# Altium footprint library SYNCBOX_TST.PcbLib: 267 footprints (part 6 of 17)
Each footprint in its own frame and in the unit in brackets; x right, y up, seen from the top. Pads: shape width x height; smd on the part's side, far side on the other; paste and mask are expansions set on the pad; w line width, h text height; cw(c..) or ccw(c..) is an arc to the next point about the centre after c.
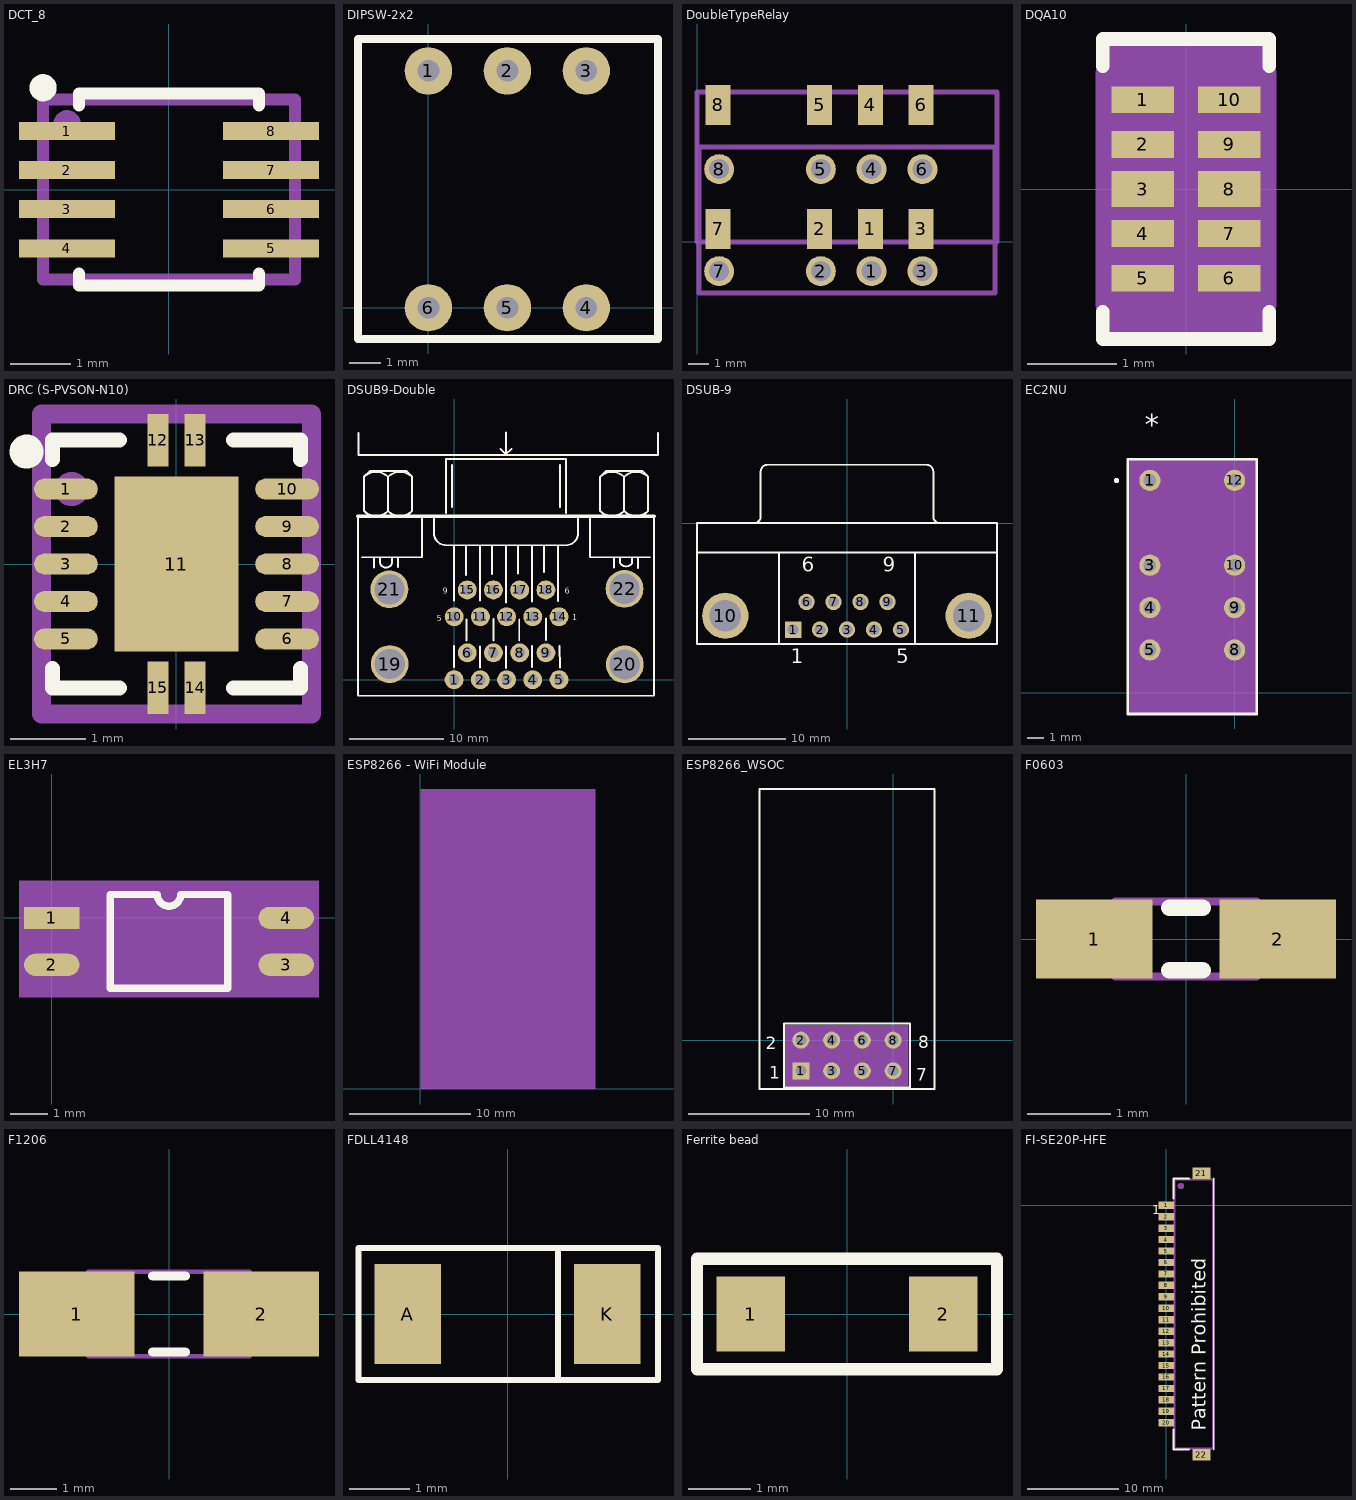
[diagram p5: the footprints below, top view; thin cyan lines are the x and y axes]

## DCT_8 [mm]
pads (8):
  rect 1.6x0.3 smd mask+0.07: 1(-1.7,0.975) 2(-1.7,0.325) 3(-1.7,-0.325) 4(-1.7,-0.975) 5(1.7,-0.975) 6(1.7,-0.325) 7(1.7,0.325) 8(1.7,0.975)
Top Overlay:
  circle w0.254: c-2.1,1.7 r0.1
  lines w0.2: -1.5,-1.4 -1.5,-1.6 1.5,-1.6 1.5,-1.4 ; -1.5,1.4 -1.5,1.6 1.5,1.6 1.5,1.4
Mechanical 16:
  circle w0.254: c-1.7,1.1 r0.1
  lines w0.2: -2.1,-1.5 2.1,-1.5 2.1,1.5 -2.1,1.5 -2.1,-1.5
Mechanical 29:
  text ".Designator" at -0.7,-0.5 h0.8
3D body "DCT-8.STEP": height 1.3, standoff 0, extent -2.1,-1.525 2.1,1.525

## DIPSW-2x2 [mil] "2 WAY DIP SW 2 CRCTS"
pads (6):
  round 60 hole 27.56: 1(0,300) 2(100,300) 3(200,300) 4(200,0) 5(100,0) 6(0,0)
Top Overlay:
  lines w10: -89.17,-39.57 -89.17,340.35 290.75,340.35 290.75,-39.57 -89.17,-39.57
3D body "KAP1103E.stp": height 397.12, standoff -137.8, extent -78.71,-50.59 282.71,445.87

## DoubleTypeRelay [mm] "DC Relay with both SMD and TH pads"
pads (16):
  rect 1.25x2 smd mask+0.2: 1(8.66,0.65) 2(6.12,0.65) 3(11.2,0.65) 4(8.66,6.85) 5(6.12,6.85) 6(11.2,6.85) 7(1.04,0.65) 8(1.04,6.85)
  round 1.5 hole 1 mask+0.25: 1(8.72,-1.47) 2(6.18,-1.47) 3(11.26,-1.47) 4(8.72,3.63) 5(6.18,3.63) 6(11.26,3.63) 7(1.1,-1.47)
  round 1.5 hole 1 paste+0.25 mask+0.25: 8(1.1,3.63)
Mechanical 1:
  lines w0.254: -0.01,0 14.99,0 14.99,7.5 -0.01,7.5 -0.01,0 ; 0.1,-2.57 14.9,-2.57 14.9,4.73 0.1,4.73 0.1,-2.57

## DQA10 [mm]
pads (10):
  rect 0.702x0.3 smd paste-0.15 mask+0: 1(-0.486,1) 2(-0.486,0.5) 4(-0.486,-0.5) 5(-0.486,-1) 6(0.486,-1) 7(0.486,-0.5) 9(0.486,0.5) 10(0.486,1)
  rect 0.702x0.4 smd paste+0 mask+0: 3(-0.486,0) 8(0.486,0)
Top Overlay:
  lines w0.152: -0.931,-1.374 -0.931,-1.681 0.931,-1.681 0.931,-1.374 ; -0.931,1.374 -0.931,1.681 0.931,1.681 0.931,1.374
Top Paste:
  region: -0.135,1.15 -0.685,1.15 -0.685,0.85 -0.135,0.85
  region: -0.135,0.65 -0.685,0.65 -0.685,0.35 -0.135,0.35
  region: -0.135,0.15 -0.685,0.15 -0.685,-0.15 -0.135,-0.15
  region: -0.135,-0.35 -0.685,-0.35 -0.685,-0.65 -0.135,-0.65
  region: -0.135,-0.85 -0.685,-0.85 -0.685,-1.15 -0.135,-1.15
  region: 0.685,-0.85 0.135,-0.85 0.135,-1.15 0.685,-1.15
  region: 0.685,-0.35 0.135,-0.35 0.135,-0.65 0.685,-0.65
  region: 0.685,0.15 0.135,0.15 0.135,-0.15 0.685,-0.15
  region: 0.685,0.65 0.135,0.65 0.135,0.35 0.685,0.35
  region: 0.685,1.15 0.135,1.15 0.135,0.85 0.685,0.85
Top Solder:
  region: -0.085,1.2 -0.735,1.2 -0.735,0.8 -0.085,0.8
  region: -0.085,0.7 -0.735,0.7 -0.735,0.3 -0.085,0.3
  region: -0.085,0.2 -0.735,0.2 -0.735,-0.2 -0.085,-0.2
  region: -0.085,-0.3 -0.735,-0.3 -0.735,-0.7 -0.085,-0.7
  region: -0.085,-0.8 -0.735,-0.8 -0.735,-1.2 -0.085,-1.2
  region: 0.735,-0.8 0.085,-0.8 0.085,-1.2 0.735,-1.2
  region: 0.735,-0.3 0.085,-0.3 0.085,-0.7 0.735,-0.7
  region: 0.735,0.2 0.085,0.2 0.085,-0.2 0.735,-0.2
  region: 0.735,0.7 0.085,0.7 0.085,0.3 0.735,0.3
  region: 0.735,1.2 0.085,1.2 0.085,0.8 0.735,0.8
Mechanical 13:
  lines w0: -0.305,1.3 ccw(c0,1.3) 0.305,1.3
  lines w0.025: -0.55,-1.3 0.55,-1.3 0.55,1.3 -0.55,1.3 -0.55,-1.3
Mechanical 15:
  region: -0.804,-1.301 -0.939,-1.301 -0.939,1.301 -0.804,1.301 -0.804,1.554 0.804,1.554 0.804,1.301 0.939,1.301 0.939,-1.301 0.804,-1.301 0.804,-1.554 -0.804,-1.554
  lines w0.152: -0.939,-1.301 -0.939,1.301 -0.804,1.301 -0.804,1.554 0.804,1.554 0.804,1.301 0.939,1.301 0.939,-1.301 0.804,-1.301 0.804,-1.554 -0.804,-1.554 -0.804,-1.301 -0.939,-1.301
3D body: height 0.25, standoff 0, extent 0,0 0.254,0.254
3D body "DQA10.stp": height 0.55, standoff 0, extent -0.55,-1.3 0.55,1.3

## DRC (S-PVSON-N10) [mm]
pads (15):
  oval 0.85x0.28 smd mask+0.025: 1(-1.475,1) 2(-1.475,0.5) 3(-1.475,0) 4(-1.475,-0.5) 5(-1.475,-1) 6(1.475,-1) 7(1.475,-0.5) 8(1.475,0) 9(1.475,0.5) 10(1.475,1)
  rect 1.65x2.337 smd paste-1.524 mask+0.025: 11(0,0)
  rect 0.28x0.7 smd mask+0.127: 12(-0.25,1.651) 13(0.25,1.651) 14(0.25,-1.651) 15(-0.25,-1.651)
Top Overlay:
  circle w0.254: c-2,1.5 r0.1
  lines w0.2: -1.651,-1.397 -1.651,-1.651 -0.762,-1.651 ; -1.651,1.397 -1.651,1.651 -0.762,1.651 ; 0.762,-1.651 1.651,-1.651 1.651,-1.397 ; 0.762,1.651 1.651,1.651 1.651,1.397
Top Paste:
  rectangle: -0.763,0.102 -0.102,1.143
  rectangle: -0.763,-1.143 -0.102,-0.102
  rectangle: 0.101,-1.143 0.761,-0.102
  rectangle: 0.101,0.102 0.761,1.143
Mechanical 16:
  circle w0.254: c-1.4,1 r0.1
  lines w0.254: -1.8,-2 1.8,-2 1.8,2 -1.8,2 -1.8,-2
Mechanical 29:
  text ".Designator" at -0.5,0.6 h1
3D body: height 1, standoff 0, extent -1.651,-1.651 1.651,1.651

## DSUB9-Double [mm] "Double Stacked D-Sub Connector 2x9"
pads (22):
  round 2 hole 1.1: 1(-0.01,-0.005) 2(2.765,-0.005) 3(5.54,-0.005) 4(8.315,-0.005) 5(11.09,0) 6(1.377,2.84) 7(4.152,2.84) 8(6.927,2.84) 9(9.702,2.84) 10(0,6.65) 11(2.772,6.65) 12(5.545,6.65) 13(8.317,6.65) 14(11.09,6.65) 15(1.377,9.49) 16(4.152,9.49) 17(6.927,9.49) 18(9.702,9.49)
  round 4 hole 3.2: 19(-6.82,1.65) 20(18.05,1.61) 21(-6.855,9.56) 22(18.02,9.61)
Top Overlay:
  lines w0.2: -10.135,23.774 -10.135,26.124 ; 4.876,24.424 5.476,23.824 ; 5.476,26.174 5.476,23.824 ; 6.076,24.424 5.476,23.824 ; 21.564,23.774 21.564,26.124
  lines w0.203: -10.177,17.292 -10.177,-1.702 21.15,-1.702 21.15,17.292 ; -10.135,23.774 21.564,23.774 ; -9.754,12.954 -3.404,12.954 -3.404,17.392 ; -9.544,17.848 ccw(c-8.272,19.121) -7,17.848 ; -9.544,21.451 cw(c-8.272,20.179) -7,21.451 ; -8.907,17.216 -9.542,17.851 -9.542,21.449 -8.907,22.084 -5.097,22.084 -4.462,21.449 -4.462,17.851 -5.097,17.216 ; -8.484,11.836 -8.484,12.954 ; -7.849,12.954 -7.849,12.319 ccw(c-7.214,12.529) -6.579,12.319 -6.579,12.954 ; -7.004,17.848 ccw(c-5.732,19.121) -4.46,17.848 ; -7.004,21.451 cw(c-5.732,20.179) -4.46,21.451 ; -7.002,17.851 -7.002,21.449 ; -5.944,11.938 -5.944,12.954 ; -2.134,17.292 -2.134,15.494 ccw(c-0.864,15.494) -0.864,14.224 11.836,14.224 ccw(c11.836,15.494) 13.106,15.494 13.106,17.392 ; -0.864,17.639 -0.864,23.354 11.836,23.354 11.836,17.639 ; -0.229,18.274 -0.229,22.719 ; -0.025,1.321 -0.025,3.581 ; -0.017,8.357 -0.017,14.224 ; 1.253,11.074 1.253,14.224 ; 1.321,4.115 1.321,6.375 ; 2.735,8.357 2.735,14.224 ; 2.743,1.27 2.743,3.531 ; 4.005,11.151 4.005,14.224 ; 4.14,4.14 4.14,6.401 ; 5.486,1.245 5.486,3.505 ; 5.486,8.153 5.486,14.224 ; 6.756,11.201 6.756,14.224 ; 6.883,4.115 6.883,6.375 ; 8.238,8.255 8.238,14.224 ; 8.255,1.321 8.255,3.581 ; 9.508,11.405 9.508,14.224 ; 9.728,4.191 9.728,6.452 ; 10.99,8.331 10.99,14.224 ; 11.151,3.543 11.176,1.295 ; 11.201,18.274 11.201,22.719 ; 14.376,17.292 14.376,12.954 20.726,12.954 ; 15.433,17.848 ccw(c16.705,19.121) 17.977,17.848 ; 15.433,21.451 cw(c16.705,20.179) 17.977,21.451 ; 16.07,17.216 15.435,17.851 15.435,21.449 16.07,22.084 19.88,22.084 20.515,21.449 20.515,17.851 19.88,17.216 ; 16.916,11.887 16.916,12.954 ; 17.551,12.954 17.551,12.319 ccw(c18.186,12.763) 18.821,12.319 18.821,12.954 ; 17.973,17.848 ccw(c19.245,19.121) 20.517,17.848 ; 17.973,21.451 cw(c19.245,20.179) 20.517,21.451 ; 17.975,17.851 17.975,21.449 ; 19.456,11.811 19.456,12.954
  lines w0.4: -10.177,17.292 21.15,17.292
  text "6" at 11.676,9.074 h0.6
  text "1" at 12.476,6.274 h0.6
  text "5" at -1.824,6.174 h0.6
  text "9" at -1.224,9.074 h0.6
3D body "178-009-613.STEP": height 32.57, standoff -2.38, extent -9.815,-1.585 20.995,23.815

## DSUB-9 [mm] "Connector; D Subminiature; 9 Position; Right Angle; Pitch 1.385 mm"
height 12.75
pads (11):
  rect 1.69x1.69 hole 1.09: 1(-5.54,-10.92)
  round 1.69 hole 1.09: 2(-2.77,-10.92) 3(0,-10.92) 4(2.77,-10.92) 5(5.54,-10.92) 6(-4.155,-8.08) 7(-1.385,-8.08) 8(1.385,-8.08) 9(4.155,-8.08)
  round 4.76 hole 3.26: 10(-12.495,-9.5) 11(12.495,-9.5)
Top Overlay:
  lines w0.2: -15.4,-3 15.4,-3 ; -9.56,0.005 ccw(c-9.56,0.7) -8.865,0.7 -8.865,5.3 ; -8.86,5.305 cw(c-8.165,5.305) -8.165,6 8.165,6 cw(c8.165,5.305) 8.86,5.305 ; -7,-12.4 -7,-3 ; 7,-12.4 7,-3 ; 8.865,5.3 8.865,0.7 ccw(c9.56,0.7) 9.56,0.005 ; -15.4,-12.4 15.4,-12.4 15.4,0 -15.4,0 -15.4,-12.4
  text "6" at -4.655,-4.975 h1.5
  text "9" at 3.655,-4.975 h1.5
  text "5" at 5.04,-14.375 h1.5
  text "1" at -5.79,-14.375 h1.5
3D body "10090099-s094vlf.stp": height 12.54, standoff -3.78, extent -15.42,-12.4 15.42,5.8

## EC2NU [mil]
pads (8):
  round 50 / inner round 60 / far side round 50 hole 30 paste+0 mask+0: 1(-200,501) 3(-200,301) 4(-200,201) 5(-200,101) 8(0,101) 9(0,201) 10(0,301) 12(0,501)
Top Overlay:
  circle w6: c-279,501 r3
  lines w6: -252.5,-50 52.5,-50 52.5,551 -252.5,551 -252.5,-50
  text "*" at -212.5,607.67 h50
Mechanical 13:
  circle w0: c-175,501 r3
  lines w0: -112,546 ccw(c-100,546) -88,546
  lines w1: -247.5,-45 47.5,-45 47.5,546 -247.5,546 -247.5,-45
  text "*" at -212.5,517.67 h50
Mechanical 15:
  region: 49.5,-47 -249.5,-47 -249.5,548 49.5,548
  region: 47.5,-45 -247.5,-45 -247.5,546 47.5,546
  lines w6: -249.5,-47 -249.5,548 49.5,548 49.5,-47 -249.5,-47
3D body: height 10, standoff 0, extent 0,0 10,10
3D body "EC2NU.stp": height 370.12, standoff -100, extent -247.48,-44.98 47.48,546

## EL3H7 [mm]
pads (4):
  rect 1.5x0.6 smd: 1(0,0)
  oval 1.5x0.6 smd: 2(0,-1.27) 3(6.35,-1.27) 4(6.35,0)
Top Overlay:
  lines w0.2: 1.585,-1.905 4.765,-1.905 4.765,0.635 3.492,0.635 cw(c3.175,0.635) 2.857,0.635 1.585,0.635 1.585,-1.905
Mechanical 15:
  rectangle: -0.889,-2.159 7.239,1.016
3D body "4_PIN_SSOP.STEP": height 1.9, standoff -0.04, extent -0.325,-1.985 6.675,0.715

## ESP8266 - WiFi Module [mm]
Mechanical 15:
  rectangle: 0,-0.025 14.503,24.816
3D body "13678.STEP": height 5.63, standoff -5.8, extent 0.003,-0.005 14.503,24.795

## ESP8266_WSOC [mil]
pads (8):
  rect 55x55 hole 35 paste+0 mask+0: 1(-300,-100)
  round 55 / inner round 60 / far side round 55 hole 35 paste+0 mask+0: 2(-300,0) 3(-200,-100) 4(-200,0) 5(-100,-100) 6(-100,0) 7(0,-100) 8(0,0)
Top Overlay:
  lines w6: -435,-159 -435,817 135,817 135,-159 -435,-159 ; -355,-154 -355,54 55,54 55,-154 -355,-154
  text "8" at 81,-26 h40
  text "7" at 75,-132 h40
  text "2" at -415,-30 h40
  text "1" at -403,-126 h40
Mechanical 13:
  lines w1: -350,-149 -350,49 50,49 50,-149 -350,-149
Mechanical 15:
  region: 50,49 -350,49 -350,-149 50,-149
3D body: height 10, standoff 0, extent 0,0 10,10
3D body "ESP8266_WSOC.STEP": height 556.49, standoff -175.01, extent -435.43,-159 135.43,817.38

## F0603 [mm]
height 0.55
pads (2):
  rect 1.4x0.95 smd: 1(-1.1,0) 2(1.1,0)
Top Overlay:
  lines w0.2: -0.2,-0.375 0.2,-0.375 ; -0.2,0.375 0.2,0.375
Mechanical 13:
  lines w0.1: -0.85,-0.45 -0.85,0.45 0.85,0.45 0.85,-0.45 -0.85,-0.45
3D body: height 0.55, standoff 0, extent -0.85,-0.45 0.85,0.45

## F1206 [mm]
height 0.7
pads (2):
  rect 2.5x1.85 smd: 1(-2,0) 2(2,0)
Top Overlay:
  lines w0.2: -0.35,-0.825 0.35,-0.825 ; -0.35,0.825 0.35,0.825
Mechanical 13:
  lines w0.1: -1.75,-0.915 1.75,-0.915 1.75,0.915 -1.75,0.915 -1.75,-0.915
3D body: height 0.7, standoff 0, extent -1.75,-0.915 1.75,0.915

## FDLL4148 [mm]
pads (2):
  rect 1.1x1.65 smd: A(-1.65,0) K(1.65,0)
Top Overlay:
  lines w0.1: -2.464,1.092 -2.464,-1.092 2.489,-1.092 2.489,1.092 ; -2.438,1.092 2.489,1.092 ; 0.813,-1.092 0.838,-1.092 0.838,1.092 0.813,1.092 2.489,1.092

## Ferrite bead [mm]
pads (2):
  rect 1.1x1.2 smd: 1(-1.55,0) 2(1.55,0)
Top Overlay:
  lines w0.2: -2.413,-0.889 -2.413,0.587 -2.413,0.889 2.413,0.889 2.413,-0.889 -2.413,-0.889
3D body "STEP-WE-CBF-1206-rev1.stp": height 1.08, standoff -0.02, extent -1.6,-0.8 1.6,0.8

## FI-SE20P-HFE [mm]
pads (22):
  rect 1.7x0.8 smd: 1(0,0) 2(0,-1.25) 3(0,-2.5) 4(0,-3.75) 5(0,-5) 6(0,-6.25) 7(0,-7.5) 8(0,-8.75) 9(0,-10) 10(0,-11.25) 11(0,-12.5) 12(0,-13.75) 13(0,-15) 14(0,-16.25) 15(0,-17.5) 16(0,-18.75) 17(0,-20) 18(0,-21.25) 19(0,-22.5) 20(0,-23.75)
  rect 2x1.25 smd: 21(3.85,3.5) 22(3.85,-27.25)
Top Overlay:
  lines w0.2: 0.8,-24.45 0.8,-26.65 2.5,-26.65 ; 0.8,0.7 0.8,2.9 2.5,2.9 ; 5.2,-26.65 5.2,2.9
  text "1" at -1.5,-1 h1.02
  text "Pattern Prohibited" at 4.3,-24.6 h1.52
Mechanical 16:
  circle w0.5: c1.6,2.1 r0.1
  lines w0.2: 0.9,-26.55 0.9,2.8 5.1,2.8 5.1,-26.55 0.9,-26.55
Mechanical 29:
  text ".Designator" at 2.2,-10.5 h1.52
3D body "K3D-FI-SE20P-HFE-R1.STEP": height 2.11, standoff 0, extent -0.25,-27.275 5.1,3.475